# Altium footprint library new-version2.PcbLib: 88 footprints (part 6 of 6)
Each footprint in its own frame and in the unit in brackets; x right, y up, seen from the top. Pads: shape width x height; smd on the part's side, far side on the other; paste and mask are expansions set on the pad; w line width, h text height; cw(c..) or ccw(c..) is an arc to the next point about the centre after c.
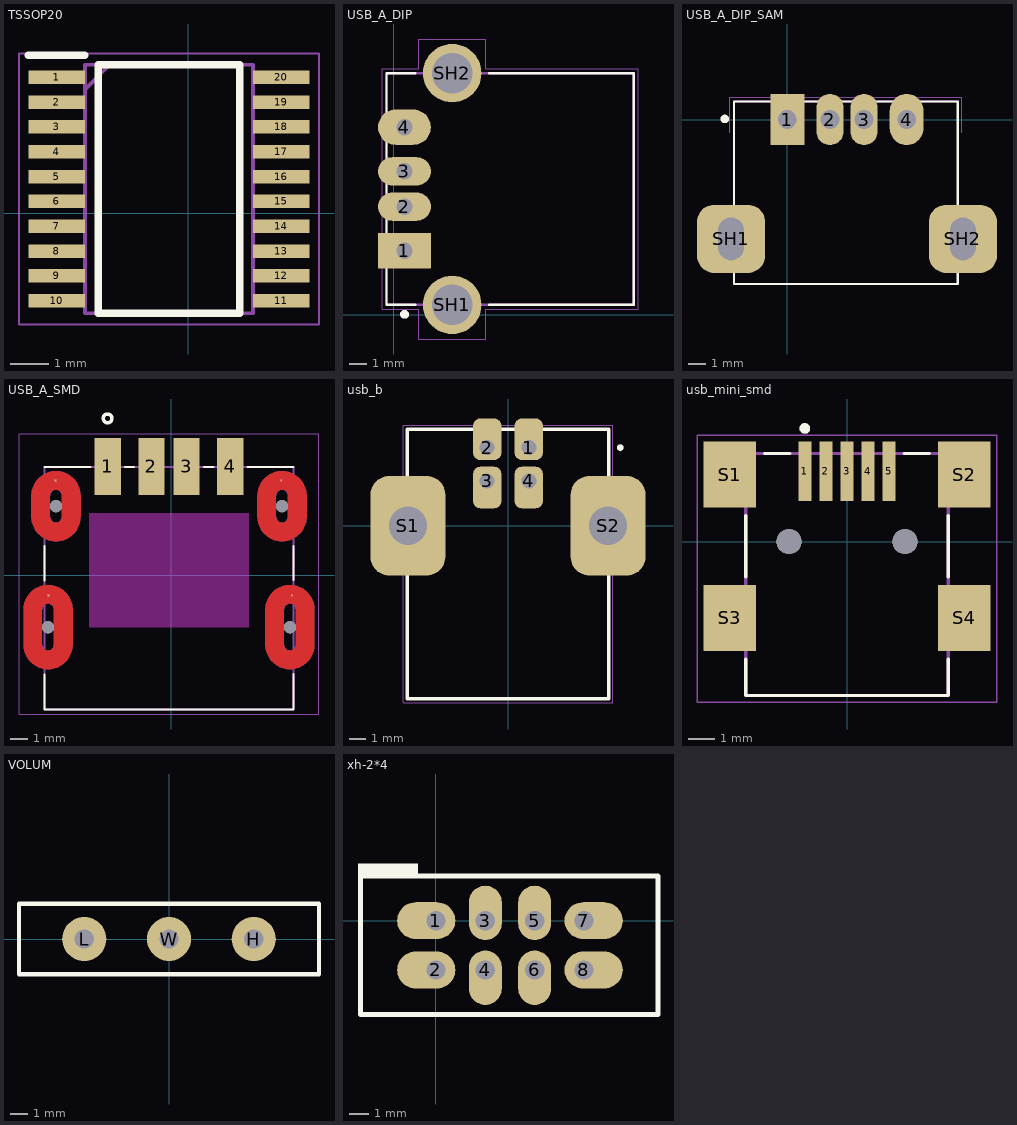
[diagram p5: the footprints below, top view; thin cyan lines are the x and y axes]

## TSSOP20 [mm]
pads (20):
  rect 1.475x0.356 smd: 1(-3.446,3.56) 2(-3.446,2.91) 3(-3.446,2.26) 4(-3.446,1.61) 5(-3.446,0.96) 6(-3.446,0.31) 7(-3.446,-0.34) 8(-3.446,-0.99) 9(-3.446,-1.64) 10(-3.446,-2.29) 11(2.43,-2.29) 12(2.43,-1.64) 13(2.43,-0.99) 14(2.43,-0.34) 15(2.43,0.31) 16(2.43,0.96) 17(2.43,1.61) 18(2.43,2.26) 19(2.43,2.91) 20(2.43,3.56)
Top Overlay:
  lines w0.2: -4.183,4.135 -2.708,4.135 ; -2.358,-2.615 -2.358,3.885 1.342,3.885 1.342,-2.615 -2.358,-2.615
Mechanical 13:
  lines w0.05: -4.433,-2.915 -4.433,4.185 3.417,4.185 3.417,-2.915 -4.433,-2.915
  lines w0.1: -2.708,3.235 -2.058,3.885 ; -2.708,-2.615 -2.708,3.885 1.692,3.885 1.692,-2.615 -2.708,-2.615

## USB_A_DIP [mm]
pads (6):
  rect 3x2 hole 0.92: 1(0.592,3.612)
  oval 3x1.6 hole 0.92: 2(0.592,6.112) 3(0.592,8.112)
  oval 3x2 hole 0.92: 4(0.592,10.612)
  round 3.316 hole 2.3: SH1(3.302,0.542) SH2(3.302,13.682)
Top Overlay:
  circle w0.3: c0.602,0.012 r0.1
  lines w0.127: 1.202,0.547 -0.418,0.547 -0.418,13.677 1.202,13.677 ; 5.402,0.547 13.582,0.547 13.582,13.677 5.402,13.677
Mechanical 13:
  lines w0.127: -0.418,0.547 13.582,0.547 13.582,13.677 -0.418,13.677 -0.418,0.547
Mechanical 15:
  lines w0.05: -0.668,0.297 1.402,0.297 1.402,-1.388 5.202,-1.388 5.202,0.297 13.832,0.297 13.832,13.927 5.202,13.927 5.202,15.612 1.402,15.612 1.402,13.927 -0.668,13.927 -0.668,0.297

## USB_A_DIP_SAM [mm]
pads (6):
  rect 2x3 hole 1.1: 1(0,0)
  oval 1.6x3 hole 1.1: 2(2.5,0) 3(4.5,0)
  oval 2x3 hole 1.1: 4(7,0)
  rrect50% 4x4 hole 2.5 slot 1.5 at 0 deg: SH1(-3.3,-7) SH2(10.3,-7)
Top Overlay:
  circle w0.3: c-3.671,0.033 r0.1
  lines w0.127: -3.136,-0.567 -3.136,1.053 9.994,1.053 9.994,-0.567 9.994,-9.652 -3.136,-9.652 -3.136,-0.381
Mechanical 13:
  lines w0.127: -3.136,1.053 9.994,1.053
Mechanical 15:
  lines w0.05: -3.386,-0.767 -3.386,1.303 10.244,1.303 10.244,-0.767

## USB_A_SMD [mm]
pads (12):
  rect 1.5x3.25 smd: 1(-3.627,6.207) 2(-1.127,6.207) 3(0.873,6.207) 4(3.373,6.207)
  rect 0.1x0.1 smd paste-1 mask+0: P1(-6.597,5.407) P2(6.273,5.407) SH1(-6.997,-1.163) SH2(6.873,-1.163)
  round 0.7 hole 0.7 unplated: ""(-7.027,-2.973) ""(-6.577,3.937) ""(6.323,3.937) ""(6.773,-2.973)
Top Layer:
  region: 6.396,5.935 6.469,5.929 6.542,5.92 6.614,5.906 6.685,5.889 6.756,5.868 6.825,5.844 6.892,5.816 6.959,5.784 7.023,5.749 7.085,5.711 7.146,5.67 7.204,5.625 7.26,5.577 7.313,5.527 7.363,5.474 7.411,5.418 7.456,5.36 7.497,5.299 7.535,5.237 7.57,5.173 7.602,5.106 7.63,5.039 7.654,4.97 7.675,4.899 7.692,4.828 7.706,4.756 7.715,4.683 7.721,4.61 7.723,4.537 7.723,3.337 7.721,3.264 7.715,3.191 7.706,3.118 7.692,3.046 7.675,2.975 7.654,2.904 7.63,2.835 7.602,2.768 7.57,2.701 7.535,2.637 7.497,2.575 7.456,2.514 7.411,2.456 7.363,2.4 7.313,2.347 7.26,2.297 7.204,2.249 7.146,2.204 7.085,2.163 7.023,2.125 6.959,2.09 6.892,2.058 6.825,2.03 6.756,2.006 6.685,1.985 6.614,1.968 6.542,1.954 6.469,1.945 6.396,1.939 6.323,1.937 6.323,2.987 6.341,2.987 6.36,2.989 6.378,2.991 6.396,2.995 6.414,2.999 6.431,3.004 6.448,3.01 6.465,3.017 6.482,3.025 6.498,3.034 6.514,3.043 6.529,3.054 6.543,3.065 6.557,3.077 6.57,3.09 6.583,3.103 6.595,3.117 6.606,3.131 6.617,3.146 6.626,3.162 6.635,3.178 6.643,3.195 6.65,3.212 6.656,3.229 6.661,3.246 6.665,3.264 6.669,3.282 6.671,3.3 6.673,3.319 6.673,3.337 6.673,4.537 6.673,4.555 6.671,4.574 6.669,4.592 6.665,4.61 6.661,4.628 6.656,4.645 6.65,4.662 6.643,4.679 6.635,4.696 6.626,4.712 6.617,4.728 6.606,4.743 6.595,4.757 6.583,4.771 6.57,4.784 6.557,4.797 6.543,4.809 6.529,4.82 6.514,4.831 6.498,4.84 6.482,4.849 6.465,4.857 6.448,4.864 6.431,4.87 6.414,4.875 6.396,4.879 6.378,4.883 6.36,4.885 6.341,4.887 6.323,4.887 6.323,5.937
  region: 6.323,4.887 6.305,4.887 6.286,4.885 6.268,4.883 6.25,4.879 6.232,4.875 6.215,4.87 6.198,4.864 6.181,4.857 6.164,4.849 6.148,4.84 6.132,4.831 6.117,4.82 6.103,4.809 6.089,4.797 6.076,4.784 6.063,4.771 6.051,4.757 6.04,4.743 6.029,4.728 6.02,4.712 6.011,4.696 6.003,4.679 5.996,4.662 5.99,4.645 5.985,4.628 5.981,4.61 5.977,4.592 5.975,4.574 5.973,4.555 5.973,4.537 5.973,3.337 5.973,3.319 5.975,3.3 5.977,3.282 5.981,3.264 5.985,3.246 5.99,3.229 5.996,3.212 6.003,3.195 6.011,3.178 6.02,3.162 6.029,3.146 6.04,3.131 6.051,3.117 6.063,3.103 6.076,3.09 6.089,3.077 6.103,3.065 6.117,3.054 6.132,3.043 6.148,3.034 6.164,3.025 6.181,3.017 6.198,3.01 6.215,3.004 6.232,2.999 6.25,2.995 6.268,2.991 6.286,2.989 6.305,2.987 6.323,2.987 6.323,1.937 6.25,1.939 6.177,1.945 6.104,1.954 6.032,1.968 5.961,1.985 5.89,2.006 5.821,2.03 5.754,2.058 5.687,2.09 5.623,2.125 5.561,2.163 5.5,2.204 5.442,2.249 5.386,2.297 5.333,2.347 5.283,2.4 5.235,2.456 5.19,2.514 5.149,2.575 5.111,2.637 5.076,2.701 5.044,2.768 5.016,2.835 4.992,2.904 4.971,2.975 4.954,3.046 4.94,3.118 4.931,3.191 4.925,3.264 4.923,3.337 4.923,4.537 4.925,4.61 4.931,4.683 4.94,4.756 4.954,4.828 4.971,4.899 4.992,4.97 5.016,5.039 5.044,5.106 5.076,5.173 5.111,5.237 5.149,5.299 5.19,5.36 5.235,5.418 5.283,5.474 5.333,5.527 5.386,5.577 5.442,5.625 5.5,5.67 5.561,5.711 5.623,5.749 5.687,5.784 5.754,5.816 5.821,5.844 5.89,5.868 5.961,5.889 6.032,5.906 6.104,5.92 6.177,5.929 6.25,5.935 6.323,5.937
  region: -6.504,5.935 -6.431,5.929 -6.358,5.92 -6.286,5.906 -6.215,5.889 -6.144,5.868 -6.075,5.844 -6.008,5.816 -5.941,5.784 -5.877,5.749 -5.815,5.711 -5.754,5.67 -5.696,5.625 -5.64,5.577 -5.587,5.527 -5.537,5.474 -5.489,5.418 -5.444,5.36 -5.403,5.299 -5.365,5.237 -5.33,5.173 -5.298,5.106 -5.27,5.039 -5.246,4.97 -5.225,4.899 -5.208,4.828 -5.194,4.756 -5.185,4.683 -5.179,4.61 -5.177,4.537 -5.177,3.337 -5.179,3.264 -5.185,3.191 -5.194,3.118 -5.208,3.046 -5.225,2.975 -5.246,2.904 -5.27,2.835 -5.298,2.768 -5.33,2.701 -5.365,2.637 -5.403,2.575 -5.444,2.514 -5.489,2.456 -5.537,2.4 -5.587,2.347 -5.64,2.297 -5.696,2.249 -5.754,2.204 -5.815,2.163 -5.877,2.125 -5.941,2.09 -6.008,2.058 -6.075,2.03 -6.144,2.006 -6.215,1.985 -6.286,1.968 -6.358,1.954 -6.431,1.945 -6.504,1.939 -6.577,1.937 -6.577,2.987 -6.559,2.987 -6.54,2.989 -6.522,2.991 -6.504,2.995 -6.486,2.999 -6.469,3.004 -6.452,3.01 -6.435,3.017 -6.418,3.025 -6.402,3.034 -6.386,3.043 -6.371,3.054 -6.357,3.065 -6.343,3.077 -6.33,3.09 -6.317,3.103 -6.305,3.117 -6.294,3.131 -6.283,3.146 -6.274,3.162 -6.265,3.178 -6.257,3.195 -6.25,3.212 -6.244,3.229 -6.239,3.246 -6.235,3.264 -6.231,3.282 -6.229,3.3 -6.227,3.319 -6.227,3.337 -6.227,4.537 -6.227,4.555 -6.229,4.574 -6.231,4.592 -6.235,4.61 -6.239,4.628 -6.244,4.645 -6.25,4.662 -6.257,4.679 -6.265,4.696 -6.274,4.712 -6.283,4.728 -6.294,4.743 -6.305,4.757 -6.317,4.771 -6.33,4.784 -6.343,4.797 -6.357,4.809 -6.371,4.82 -6.386,4.831 -6.402,4.84 -6.418,4.849 -6.435,4.857 -6.452,4.864 -6.469,4.87 -6.486,4.875 -6.504,4.879 -6.522,4.883 -6.54,4.885 -6.559,4.887 -6.577,4.887 -6.577,5.937
  region: -6.577,4.887 -6.595,4.887 -6.614,4.885 -6.632,4.883 -6.65,4.879 -6.668,4.875 -6.685,4.87 -6.702,4.864 -6.719,4.857 -6.736,4.849 -6.752,4.84 -6.768,4.831 -6.783,4.82 -6.797,4.809 -6.811,4.797 -6.824,4.784 -6.837,4.771 -6.849,4.757 -6.86,4.743 -6.871,4.728 -6.88,4.712 -6.889,4.696 -6.897,4.679 -6.904,4.662 -6.91,4.645 -6.915,4.628 -6.919,4.61 -6.923,4.592 -6.925,4.574 -6.927,4.555 -6.927,4.537 -6.927,3.337 -6.927,3.319 -6.925,3.3 -6.923,3.282 -6.919,3.264 -6.915,3.246 -6.91,3.229 -6.904,3.212 -6.897,3.195 -6.889,3.178 -6.88,3.162 -6.871,3.146 -6.86,3.131 -6.849,3.117 -6.837,3.103 -6.824,3.09 -6.811,3.077 -6.797,3.065 -6.783,3.054 -6.768,3.043 -6.752,3.034 -6.736,3.025 -6.719,3.017 -6.702,3.01 -6.685,3.004 -6.668,2.999 -6.65,2.995 -6.632,2.991 -6.614,2.989 -6.595,2.987 -6.577,2.987 -6.577,1.937 -6.65,1.939 -6.723,1.945 -6.796,1.954 -6.868,1.968 -6.939,1.985 -7.01,2.006 -7.079,2.03 -7.146,2.058 -7.213,2.09 -7.277,2.125 -7.339,2.163 -7.4,2.204 -7.458,2.249 -7.514,2.297 -7.567,2.347 -7.617,2.4 -7.665,2.456 -7.71,2.514 -7.751,2.575 -7.789,2.637 -7.824,2.701 -7.856,2.768 -7.884,2.835 -7.908,2.904 -7.929,2.975 -7.946,3.046 -7.96,3.118 -7.969,3.191 -7.975,3.264 -7.977,3.337 -7.977,4.537 -7.975,4.61 -7.969,4.683 -7.96,4.756 -7.946,4.828 -7.929,4.899 -7.908,4.97 -7.884,5.039 -7.856,5.106 -7.824,5.173 -7.789,5.237 -7.751,5.299 -7.71,5.36 -7.665,5.418 -7.617,5.474 -7.567,5.527 -7.514,5.577 -7.458,5.625 -7.4,5.67 -7.339,5.711 -7.277,5.749 -7.213,5.784 -7.146,5.816 -7.079,5.844 -7.01,5.868 -6.939,5.889 -6.868,5.906 -6.796,5.92 -6.723,5.929 -6.65,5.935 -6.577,5.937
  region: 6.846,-0.565 6.919,-0.571 6.992,-0.58 7.064,-0.594 7.135,-0.611 7.206,-0.632 7.275,-0.656 7.342,-0.684 7.409,-0.716 7.473,-0.751 7.535,-0.789 7.596,-0.83 7.654,-0.875 7.71,-0.923 7.763,-0.973 7.813,-1.026 7.861,-1.082 7.906,-1.14 7.947,-1.201 7.985,-1.263 8.02,-1.327 8.052,-1.394 8.08,-1.461 8.104,-1.53 8.125,-1.601 8.142,-1.672 8.156,-1.744 8.165,-1.817 8.171,-1.89 8.173,-1.963 8.173,-3.963 8.171,-4.036 8.165,-4.109 8.156,-4.182 8.142,-4.254 8.125,-4.325 8.104,-4.396 8.08,-4.465 8.052,-4.532 8.02,-4.599 7.985,-4.663 7.947,-4.725 7.906,-4.786 7.861,-4.844 7.813,-4.9 7.763,-4.953 7.71,-5.003 7.654,-5.051 7.596,-5.096 7.535,-5.137 7.473,-5.175 7.409,-5.21 7.342,-5.242 7.275,-5.27 7.206,-5.294 7.135,-5.315 7.064,-5.332 6.992,-5.346 6.919,-5.355 6.846,-5.361 6.773,-5.363 6.773,-4.313 6.791,-4.313 6.81,-4.311 6.828,-4.309 6.846,-4.305 6.864,-4.301 6.881,-4.296 6.898,-4.29 6.915,-4.283 6.932,-4.275 6.948,-4.266 6.964,-4.257 6.979,-4.246 6.993,-4.235 7.007,-4.223 7.02,-4.21 7.033,-4.197 7.045,-4.183 7.056,-4.169 7.067,-4.154 7.076,-4.138 7.085,-4.122 7.093,-4.105 7.1,-4.088 7.106,-4.071 7.111,-4.054 7.115,-4.036 7.119,-4.018 7.121,-4 7.123,-3.981 7.123,-3.963 7.123,-1.963 7.123,-1.945 7.121,-1.926 7.119,-1.908 7.115,-1.89 7.111,-1.872 7.106,-1.855 7.1,-1.838 7.093,-1.821 7.085,-1.804 7.076,-1.788 7.067,-1.772 7.056,-1.757 7.045,-1.743 7.033,-1.729 7.02,-1.716 7.007,-1.703 6.993,-1.691 6.979,-1.68 6.964,-1.669 6.948,-1.66 6.932,-1.651 6.915,-1.643 6.898,-1.636 6.881,-1.63 6.864,-1.625 6.846,-1.621 6.828,-1.617 6.81,-1.615 6.791,-1.613 6.773,-1.613 6.773,-0.563
  region: 6.773,-1.613 6.755,-1.613 6.736,-1.615 6.718,-1.617 6.7,-1.621 6.682,-1.625 6.665,-1.63 6.648,-1.636 6.631,-1.643 6.614,-1.651 6.598,-1.66 6.582,-1.669 6.567,-1.68 6.553,-1.691 6.539,-1.703 6.526,-1.716 6.513,-1.729 6.501,-1.743 6.49,-1.757 6.479,-1.772 6.47,-1.788 6.461,-1.804 6.453,-1.821 6.446,-1.838 6.44,-1.855 6.435,-1.872 6.431,-1.89 6.427,-1.908 6.425,-1.926 6.423,-1.945 6.423,-1.963 6.423,-3.963 6.423,-3.981 6.425,-4 6.427,-4.018 6.431,-4.036 6.435,-4.054 6.44,-4.071 6.446,-4.088 6.453,-4.105 6.461,-4.122 6.47,-4.138 6.479,-4.154 6.49,-4.169 6.501,-4.183 6.513,-4.197 6.526,-4.21 6.539,-4.223 6.553,-4.235 6.567,-4.246 6.582,-4.257 6.598,-4.266 6.614,-4.275 6.631,-4.283 6.648,-4.29 6.665,-4.296 6.682,-4.301 6.7,-4.305 6.718,-4.309 6.736,-4.311 6.755,-4.313 6.773,-4.313 6.773,-5.363 6.7,-5.361 6.627,-5.355 6.554,-5.346 6.482,-5.332 6.411,-5.315 6.34,-5.294 6.271,-5.27 6.204,-5.242 6.137,-5.21 6.073,-5.175 6.011,-5.137 5.95,-5.096 5.892,-5.051 5.836,-5.003 5.783,-4.953 5.733,-4.9 5.685,-4.844 5.64,-4.786 5.599,-4.725 5.561,-4.663 5.526,-4.599 5.494,-4.532 5.466,-4.465 5.442,-4.396 5.421,-4.325 5.404,-4.254 5.39,-4.182 5.381,-4.109 5.375,-4.036 5.373,-3.963 5.373,-1.963 5.375,-1.89 5.381,-1.817 5.39,-1.744 5.404,-1.672 5.421,-1.601 5.442,-1.53 5.466,-1.461 5.494,-1.394 5.526,-1.327 5.561,-1.263 5.599,-1.201 5.64,-1.14 5.685,-1.082 5.733,-1.026 5.783,-0.973 5.836,-0.923 5.892,-0.875 5.95,-0.83 6.011,-0.789 6.073,-0.751 6.137,-0.716 6.204,-0.684 6.271,-0.656 6.34,-0.632 6.411,-0.611 6.482,-0.594 6.554,-0.58 6.627,-0.571 6.7,-0.565 6.773,-0.563
  region: -6.954,-0.565 -6.881,-0.571 -6.808,-0.58 -6.736,-0.594 -6.665,-0.611 -6.594,-0.632 -6.525,-0.656 -6.458,-0.684 -6.391,-0.716 -6.327,-0.751 -6.265,-0.789 -6.204,-0.83 -6.146,-0.875 -6.09,-0.923 -6.037,-0.973 -5.987,-1.026 -5.939,-1.082 -5.894,-1.14 -5.853,-1.201 -5.815,-1.263 -5.78,-1.327 -5.748,-1.394 -5.72,-1.461 -5.696,-1.53 -5.675,-1.601 -5.658,-1.672 -5.644,-1.744 -5.635,-1.817 -5.629,-1.89 -5.627,-1.963 -5.627,-3.963 -5.629,-4.036 -5.635,-4.109 -5.644,-4.182 -5.658,-4.254 -5.675,-4.325 -5.696,-4.396 -5.72,-4.465 -5.748,-4.532 -5.78,-4.599 -5.815,-4.663 -5.853,-4.725 -5.894,-4.786 -5.939,-4.844 -5.987,-4.9 -6.037,-4.953 -6.09,-5.003 -6.146,-5.051 -6.204,-5.096 -6.265,-5.137 -6.327,-5.175 -6.391,-5.21 -6.458,-5.242 -6.525,-5.27 -6.594,-5.294 -6.665,-5.315 -6.736,-5.332 -6.808,-5.346 -6.881,-5.355 -6.954,-5.361 -7.027,-5.363 -7.027,-4.313 -7.009,-4.313 -6.99,-4.311 -6.972,-4.309 -6.954,-4.305 -6.936,-4.301 -6.919,-4.296 -6.902,-4.29 -6.885,-4.283 -6.868,-4.275 -6.852,-4.266 -6.836,-4.257 -6.821,-4.246 -6.807,-4.235 -6.793,-4.223 -6.78,-4.21 -6.767,-4.197 -6.755,-4.183 -6.744,-4.169 -6.733,-4.154 -6.724,-4.138 -6.715,-4.122 -6.707,-4.105 -6.7,-4.088 -6.694,-4.071 -6.689,-4.054 -6.685,-4.036 -6.681,-4.018 -6.679,-4 -6.677,-3.981 -6.677,-3.963 -6.677,-1.963 -6.677,-1.945 -6.679,-1.926 -6.681,-1.908 -6.685,-1.89 -6.689,-1.872 -6.694,-1.855 -6.7,-1.838 -6.707,-1.821 -6.715,-1.804 -6.724,-1.788 -6.733,-1.772 -6.744,-1.757 -6.755,-1.743 -6.767,-1.729 -6.78,-1.716 -6.793,-1.703 -6.807,-1.691 -6.821,-1.68 -6.836,-1.669 -6.852,-1.66 -6.868,-1.651 -6.885,-1.643 -6.902,-1.636 -6.919,-1.63 -6.936,-1.625 -6.954,-1.621 -6.972,-1.617 -6.99,-1.615 -7.009,-1.613 -7.027,-1.613 -7.027,-0.563
  region: -7.027,-1.613 -7.045,-1.613 -7.064,-1.615 -7.082,-1.617 -7.1,-1.621 -7.118,-1.625 -7.135,-1.63 -7.152,-1.636 -7.169,-1.643 -7.186,-1.651 -7.202,-1.66 -7.218,-1.669 -7.233,-1.68 -7.247,-1.691 -7.261,-1.703 -7.274,-1.716 -7.287,-1.729 -7.299,-1.743 -7.31,-1.757 -7.321,-1.772 -7.33,-1.788 -7.339,-1.804 -7.347,-1.821 -7.354,-1.838 -7.36,-1.855 -7.365,-1.872 -7.369,-1.89 -7.373,-1.908 -7.375,-1.926 -7.377,-1.945 -7.377,-1.963 -7.377,-3.963 -7.377,-3.981 -7.375,-4 -7.373,-4.018 -7.369,-4.036 -7.365,-4.054 -7.36,-4.071 -7.354,-4.088 -7.347,-4.105 -7.339,-4.122 -7.33,-4.138 -7.321,-4.154 -7.31,-4.169 -7.299,-4.183 -7.287,-4.197 -7.274,-4.21 -7.261,-4.223 -7.247,-4.235 -7.233,-4.246 -7.218,-4.257 -7.202,-4.266 -7.186,-4.275 -7.169,-4.283 -7.152,-4.29 -7.135,-4.296 -7.118,-4.301 -7.1,-4.305 -7.082,-4.309 -7.064,-4.311 -7.045,-4.313 -7.027,-4.313 -7.027,-5.363 -7.1,-5.361 -7.173,-5.355 -7.246,-5.346 -7.318,-5.332 -7.389,-5.315 -7.46,-5.294 -7.529,-5.27 -7.596,-5.242 -7.663,-5.21 -7.727,-5.175 -7.789,-5.137 -7.85,-5.096 -7.908,-5.051 -7.964,-5.003 -8.017,-4.953 -8.067,-4.9 -8.115,-4.844 -8.16,-4.786 -8.201,-4.725 -8.239,-4.663 -8.274,-4.599 -8.306,-4.532 -8.334,-4.465 -8.358,-4.396 -8.379,-4.325 -8.396,-4.254 -8.41,-4.182 -8.419,-4.109 -8.425,-4.036 -8.427,-3.963 -8.427,-1.963 -8.425,-1.89 -8.419,-1.817 -8.41,-1.744 -8.396,-1.672 -8.379,-1.601 -8.358,-1.53 -8.334,-1.461 -8.306,-1.394 -8.274,-1.327 -8.239,-1.263 -8.201,-1.201 -8.16,-1.14 -8.115,-1.082 -8.067,-1.026 -8.017,-0.973 -7.964,-0.923 -7.908,-0.875 -7.85,-0.83 -7.789,-0.789 -7.727,-0.751 -7.663,-0.716 -7.596,-0.684 -7.529,-0.656 -7.46,-0.632 -7.389,-0.611 -7.318,-0.594 -7.246,-0.58 -7.173,-0.571 -7.1,-0.565 -7.027,-0.563
Bottom Layer:
  region: 6.396,5.935 6.469,5.929 6.542,5.92 6.614,5.906 6.685,5.889 6.756,5.868 6.825,5.844 6.892,5.816 6.959,5.784 7.023,5.749 7.085,5.711 7.146,5.67 7.204,5.625 7.26,5.577 7.313,5.527 7.363,5.474 7.411,5.418 7.456,5.36 7.497,5.299 7.535,5.237 7.57,5.173 7.602,5.106 7.63,5.039 7.654,4.97 7.675,4.899 7.692,4.828 7.706,4.756 7.715,4.683 7.721,4.61 7.723,4.537 7.723,3.337 7.721,3.264 7.715,3.191 7.706,3.118 7.692,3.046 7.675,2.975 7.654,2.904 7.63,2.835 7.602,2.768 7.57,2.701 7.535,2.637 7.497,2.575 7.456,2.514 7.411,2.456 7.363,2.4 7.313,2.347 7.26,2.297 7.204,2.249 7.146,2.204 7.085,2.163 7.023,2.125 6.959,2.09 6.892,2.058 6.825,2.03 6.756,2.006 6.685,1.985 6.614,1.968 6.542,1.954 6.469,1.945 6.396,1.939 6.323,1.937 6.323,2.987 6.341,2.987 6.36,2.989 6.378,2.991 6.396,2.995 6.414,2.999 6.431,3.004 6.448,3.01 6.465,3.017 6.482,3.025 6.498,3.034 6.514,3.043 6.529,3.054 6.543,3.065 6.557,3.077 6.57,3.09 6.583,3.103 6.595,3.117 6.606,3.131 6.617,3.146 6.626,3.162 6.635,3.178 6.643,3.195 6.65,3.212 6.656,3.229 6.661,3.246 6.665,3.264 6.669,3.282 6.671,3.3 6.673,3.319 6.673,3.337 6.673,4.537 6.673,4.555 6.671,4.574 6.669,4.592 6.665,4.61 6.661,4.628 6.656,4.645 6.65,4.662 6.643,4.679 6.635,4.696 6.626,4.712 6.617,4.728 6.606,4.743 6.595,4.757 6.583,4.771 6.57,4.784 6.557,4.797 6.543,4.809 6.529,4.82 6.514,4.831 6.498,4.84 6.482,4.849 6.465,4.857 6.448,4.864 6.431,4.87 6.414,4.875 6.396,4.879 6.378,4.883 6.36,4.885 6.341,4.887 6.323,4.887 6.323,5.937
  region: 6.323,4.887 6.305,4.887 6.286,4.885 6.268,4.883 6.25,4.879 6.232,4.875 6.215,4.87 6.198,4.864 6.181,4.857 6.164,4.849 6.148,4.84 6.132,4.831 6.117,4.82 6.103,4.809 6.089,4.797 6.076,4.784 6.063,4.771 6.051,4.757 6.04,4.743 6.029,4.728 6.02,4.712 6.011,4.696 6.003,4.679 5.996,4.662 5.99,4.645 5.985,4.628 5.981,4.61 5.977,4.592 5.975,4.574 5.973,4.555 5.973,4.537 5.973,3.337 5.973,3.319 5.975,3.3 5.977,3.282 5.981,3.264 5.985,3.246 5.99,3.229 5.996,3.212 6.003,3.195 6.011,3.178 6.02,3.162 6.029,3.146 6.04,3.131 6.051,3.117 6.063,3.103 6.076,3.09 6.089,3.077 6.103,3.065 6.117,3.054 6.132,3.043 6.148,3.034 6.164,3.025 6.181,3.017 6.198,3.01 6.215,3.004 6.232,2.999 6.25,2.995 6.268,2.991 6.286,2.989 6.305,2.987 6.323,2.987 6.323,1.937 6.25,1.939 6.177,1.945 6.104,1.954 6.032,1.968 5.961,1.985 5.89,2.006 5.821,2.03 5.754,2.058 5.687,2.09 5.623,2.125 5.561,2.163 5.5,2.204 5.442,2.249 5.386,2.297 5.333,2.347 5.283,2.4 5.235,2.456 5.19,2.514 5.149,2.575 5.111,2.637 5.076,2.701 5.044,2.768 5.016,2.835 4.992,2.904 4.971,2.975 4.954,3.046 4.94,3.118 4.931,3.191 4.925,3.264 4.923,3.337 4.923,4.537 4.925,4.61 4.931,4.683 4.94,4.756 4.954,4.828 4.971,4.899 4.992,4.97 5.016,5.039 5.044,5.106 5.076,5.173 5.111,5.237 5.149,5.299 5.19,5.36 5.235,5.418 5.283,5.474 5.333,5.527 5.386,5.577 5.442,5.625 5.5,5.67 5.561,5.711 5.623,5.749 5.687,5.784 5.754,5.816 5.821,5.844 5.89,5.868 5.961,5.889 6.032,5.906 6.104,5.92 6.177,5.929 6.25,5.935 6.323,5.937
  region: -6.504,5.935 -6.431,5.929 -6.358,5.92 -6.286,5.906 -6.215,5.889 -6.144,5.868 -6.075,5.844 -6.008,5.816 -5.941,5.784 -5.877,5.749 -5.815,5.711 -5.754,5.67 -5.696,5.625 -5.64,5.577 -5.587,5.527 -5.537,5.474 -5.489,5.418 -5.444,5.36 -5.403,5.299 -5.365,5.237 -5.33,5.173 -5.298,5.106 -5.27,5.039 -5.246,4.97 -5.225,4.899 -5.208,4.828 -5.194,4.756 -5.185,4.683 -5.179,4.61 -5.177,4.537 -5.177,3.337 -5.179,3.264 -5.185,3.191 -5.194,3.118 -5.208,3.046 -5.225,2.975 -5.246,2.904 -5.27,2.835 -5.298,2.768 -5.33,2.701 -5.365,2.637 -5.403,2.575 -5.444,2.514 -5.489,2.456 -5.537,2.4 -5.587,2.347 -5.64,2.297 -5.696,2.249 -5.754,2.204 -5.815,2.163 -5.877,2.125 -5.941,2.09 -6.008,2.058 -6.075,2.03 -6.144,2.006 -6.215,1.985 -6.286,1.968 -6.358,1.954 -6.431,1.945 -6.504,1.939 -6.577,1.937 -6.577,2.987 -6.559,2.987 -6.54,2.989 -6.522,2.991 -6.504,2.995 -6.486,2.999 -6.469,3.004 -6.452,3.01 -6.435,3.017 -6.418,3.025 -6.402,3.034 -6.386,3.043 -6.371,3.054 -6.357,3.065 -6.343,3.077 -6.33,3.09 -6.317,3.103 -6.305,3.117 -6.294,3.131 -6.283,3.146 -6.274,3.162 -6.265,3.178 -6.257,3.195 -6.25,3.212 -6.244,3.229 -6.239,3.246 -6.235,3.264 -6.231,3.282 -6.229,3.3 -6.227,3.319 -6.227,3.337 -6.227,4.537 -6.227,4.555 -6.229,4.574 -6.231,4.592 -6.235,4.61 -6.239,4.628 -6.244,4.645 -6.25,4.662 -6.257,4.679 -6.265,4.696 -6.274,4.712 -6.283,4.728 -6.294,4.743 -6.305,4.757 -6.317,4.771 -6.33,4.784 -6.343,4.797 -6.357,4.809 -6.371,4.82 -6.386,4.831 -6.402,4.84 -6.418,4.849 -6.435,4.857 -6.452,4.864 -6.469,4.87 -6.486,4.875 -6.504,4.879 -6.522,4.883 -6.54,4.885 -6.559,4.887 -6.577,4.887 -6.577,5.937
  region: -6.577,4.887 -6.595,4.887 -6.614,4.885 -6.632,4.883 -6.65,4.879 -6.668,4.875 -6.685,4.87 -6.702,4.864 -6.719,4.857 -6.736,4.849 -6.752,4.84 -6.768,4.831 -6.783,4.82 -6.797,4.809 -6.811,4.797 -6.824,4.784 -6.837,4.771 -6.849,4.757 -6.86,4.743 -6.871,4.728 -6.88,4.712 -6.889,4.696 -6.897,4.679 -6.904,4.662 -6.91,4.645 -6.915,4.628 -6.919,4.61 -6.923,4.592 -6.925,4.574 -6.927,4.555 -6.927,4.537 -6.927,3.337 -6.927,3.319 -6.925,3.3 -6.923,3.282 -6.919,3.264 -6.915,3.246 -6.91,3.229 -6.904,3.212 -6.897,3.195 -6.889,3.178 -6.88,3.162 -6.871,3.146 -6.86,3.131 -6.849,3.117 -6.837,3.103 -6.824,3.09 -6.811,3.077 -6.797,3.065 -6.783,3.054 -6.768,3.043 -6.752,3.034 -6.736,3.025 -6.719,3.017 -6.702,3.01 -6.685,3.004 -6.668,2.999 -6.65,2.995 -6.632,2.991 -6.614,2.989 -6.595,2.987 -6.577,2.987 -6.577,1.937 -6.65,1.939 -6.723,1.945 -6.796,1.954 -6.868,1.968 -6.939,1.985 -7.01,2.006 -7.079,2.03 -7.146,2.058 -7.213,2.09 -7.277,2.125 -7.339,2.163 -7.4,2.204 -7.458,2.249 -7.514,2.297 -7.567,2.347 -7.617,2.4 -7.665,2.456 -7.71,2.514 -7.751,2.575 -7.789,2.637 -7.824,2.701 -7.856,2.768 -7.884,2.835 -7.908,2.904 -7.929,2.975 -7.946,3.046 -7.96,3.118 -7.969,3.191 -7.975,3.264 -7.977,3.337 -7.977,4.537 -7.975,4.61 -7.969,4.683 -7.96,4.756 -7.946,4.828 -7.929,4.899 -7.908,4.97 -7.884,5.039 -7.856,5.106 -7.824,5.173 -7.789,5.237 -7.751,5.299 -7.71,5.36 -7.665,5.418 -7.617,5.474 -7.567,5.527 -7.514,5.577 -7.458,5.625 -7.4,5.67 -7.339,5.711 -7.277,5.749 -7.213,5.784 -7.146,5.816 -7.079,5.844 -7.01,5.868 -6.939,5.889 -6.868,5.906 -6.796,5.92 -6.723,5.929 -6.65,5.935 -6.577,5.937
  region: 6.846,-0.565 6.919,-0.571 6.992,-0.58 7.064,-0.594 7.135,-0.611 7.206,-0.632 7.275,-0.656 7.342,-0.684 7.409,-0.716 7.473,-0.751 7.535,-0.789 7.596,-0.83 7.654,-0.875 7.71,-0.923 7.763,-0.973 7.813,-1.026 7.861,-1.082 7.906,-1.14 7.947,-1.201 7.985,-1.263 8.02,-1.327 8.052,-1.394 8.08,-1.461 8.104,-1.53 8.125,-1.601 8.142,-1.672 8.156,-1.744 8.165,-1.817 8.171,-1.89 8.173,-1.963 8.173,-3.963 8.171,-4.036 8.165,-4.109 8.156,-4.182 8.142,-4.254 8.125,-4.325 8.104,-4.396 8.08,-4.465 8.052,-4.532 8.02,-4.599 7.985,-4.663 7.947,-4.725 7.906,-4.786 7.861,-4.844 7.813,-4.9 7.763,-4.953 7.71,-5.003 7.654,-5.051 7.596,-5.096 7.535,-5.137 7.473,-5.175 7.409,-5.21 7.342,-5.242 7.275,-5.27 7.206,-5.294 7.135,-5.315 7.064,-5.332 6.992,-5.346 6.919,-5.355 6.846,-5.361 6.773,-5.363 6.773,-4.313 6.791,-4.313 6.81,-4.311 6.828,-4.309 6.846,-4.305 6.864,-4.301 6.881,-4.296 6.898,-4.29 6.915,-4.283 6.932,-4.275 6.948,-4.266 6.964,-4.257 6.979,-4.246 6.993,-4.235 7.007,-4.223 7.02,-4.21 7.033,-4.197 7.045,-4.183 7.056,-4.169 7.067,-4.154 7.076,-4.138 7.085,-4.122 7.093,-4.105 7.1,-4.088 7.106,-4.071 7.111,-4.054 7.115,-4.036 7.119,-4.018 7.121,-4 7.123,-3.981 7.123,-3.963 7.123,-1.963 7.123,-1.945 7.121,-1.926 7.119,-1.908 7.115,-1.89 7.111,-1.872 7.106,-1.855 7.1,-1.838 7.093,-1.821 7.085,-1.804 7.076,-1.788 7.067,-1.772 7.056,-1.757 7.045,-1.743 7.033,-1.729 7.02,-1.716 7.007,-1.703 6.993,-1.691 6.979,-1.68 6.964,-1.669 6.948,-1.66 6.932,-1.651 6.915,-1.643 6.898,-1.636 6.881,-1.63 6.864,-1.625 6.846,-1.621 6.828,-1.617 6.81,-1.615 6.791,-1.613 6.773,-1.613 6.773,-0.563
  region: 6.773,-1.613 6.755,-1.613 6.736,-1.615 6.718,-1.617 6.7,-1.621 6.682,-1.625 6.665,-1.63 6.648,-1.636 6.631,-1.643 6.614,-1.651 6.598,-1.66 6.582,-1.669 6.567,-1.68 6.553,-1.691 6.539,-1.703 6.526,-1.716 6.513,-1.729 6.501,-1.743 6.49,-1.757 6.479,-1.772 6.47,-1.788 6.461,-1.804 6.453,-1.821 6.446,-1.838 6.44,-1.855 6.435,-1.872 6.431,-1.89 6.427,-1.908 6.425,-1.926 6.423,-1.945 6.423,-1.963 6.423,-3.963 6.423,-3.981 6.425,-4 6.427,-4.018 6.431,-4.036 6.435,-4.054 6.44,-4.071 6.446,-4.088 6.453,-4.105 6.461,-4.122 6.47,-4.138 6.479,-4.154 6.49,-4.169 6.501,-4.183 6.513,-4.197 6.526,-4.21 6.539,-4.223 6.553,-4.235 6.567,-4.246 6.582,-4.257 6.598,-4.266 6.614,-4.275 6.631,-4.283 6.648,-4.29 6.665,-4.296 6.682,-4.301 6.7,-4.305 6.718,-4.309 6.736,-4.311 6.755,-4.313 6.773,-4.313 6.773,-5.363 6.7,-5.361 6.627,-5.355 6.554,-5.346 6.482,-5.332 6.411,-5.315 6.34,-5.294 6.271,-5.27 6.204,-5.242 6.137,-5.21 6.073,-5.175 6.011,-5.137 5.95,-5.096 5.892,-5.051 5.836,-5.003 5.783,-4.953 5.733,-4.9 5.685,-4.844 5.64,-4.786 5.599,-4.725 5.561,-4.663 5.526,-4.599 5.494,-4.532 5.466,-4.465 5.442,-4.396 5.421,-4.325 5.404,-4.254 5.39,-4.182 5.381,-4.109 5.375,-4.036 5.373,-3.963 5.373,-1.963 5.375,-1.89 5.381,-1.817 5.39,-1.744 5.404,-1.672 5.421,-1.601 5.442,-1.53 5.466,-1.461 5.494,-1.394 5.526,-1.327 5.561,-1.263 5.599,-1.201 5.64,-1.14 5.685,-1.082 5.733,-1.026 5.783,-0.973 5.836,-0.923 5.892,-0.875 5.95,-0.83 6.011,-0.789 6.073,-0.751 6.137,-0.716 6.204,-0.684 6.271,-0.656 6.34,-0.632 6.411,-0.611 6.482,-0.594 6.554,-0.58 6.627,-0.571 6.7,-0.565 6.773,-0.563
  region: -6.954,-0.565 -6.881,-0.571 -6.808,-0.58 -6.736,-0.594 -6.665,-0.611 -6.594,-0.632 -6.525,-0.656 -6.458,-0.684 -6.391,-0.716 -6.327,-0.751 -6.265,-0.789 -6.204,-0.83 -6.146,-0.875 -6.09,-0.923 -6.037,-0.973 -5.987,-1.026 -5.939,-1.082 -5.894,-1.14 -5.853,-1.201 -5.815,-1.263 -5.78,-1.327 -5.748,-1.394 -5.72,-1.461 -5.696,-1.53 -5.675,-1.601 -5.658,-1.672 -5.644,-1.744 -5.635,-1.817 -5.629,-1.89 -5.627,-1.963 -5.627,-3.963 -5.629,-4.036 -5.635,-4.109 -5.644,-4.182 -5.658,-4.254 -5.675,-4.325 -5.696,-4.396 -5.72,-4.465 -5.748,-4.532 -5.78,-4.599 -5.815,-4.663 -5.853,-4.725 -5.894,-4.786 -5.939,-4.844 -5.987,-4.9 -6.037,-4.953 -6.09,-5.003 -6.146,-5.051 -6.204,-5.096 -6.265,-5.137 -6.327,-5.175 -6.391,-5.21 -6.458,-5.242 -6.525,-5.27 -6.594,-5.294 -6.665,-5.315 -6.736,-5.332 -6.808,-5.346 -6.881,-5.355 -6.954,-5.361 -7.027,-5.363 -7.027,-4.313 -7.009,-4.313 -6.99,-4.311 -6.972,-4.309 -6.954,-4.305 -6.936,-4.301 -6.919,-4.296 -6.902,-4.29 -6.885,-4.283 -6.868,-4.275 -6.852,-4.266 -6.836,-4.257 -6.821,-4.246 -6.807,-4.235 -6.793,-4.223 -6.78,-4.21 -6.767,-4.197 -6.755,-4.183 -6.744,-4.169 -6.733,-4.154 -6.724,-4.138 -6.715,-4.122 -6.707,-4.105 -6.7,-4.088 -6.694,-4.071 -6.689,-4.054 -6.685,-4.036 -6.681,-4.018 -6.679,-4 -6.677,-3.981 -6.677,-3.963 -6.677,-1.963 -6.677,-1.945 -6.679,-1.926 -6.681,-1.908 -6.685,-1.89 -6.689,-1.872 -6.694,-1.855 -6.7,-1.838 -6.707,-1.821 -6.715,-1.804 -6.724,-1.788 -6.733,-1.772 -6.744,-1.757 -6.755,-1.743 -6.767,-1.729 -6.78,-1.716 -6.793,-1.703 -6.807,-1.691 -6.821,-1.68 -6.836,-1.669 -6.852,-1.66 -6.868,-1.651 -6.885,-1.643 -6.902,-1.636 -6.919,-1.63 -6.936,-1.625 -6.954,-1.621 -6.972,-1.617 -6.99,-1.615 -7.009,-1.613 -7.027,-1.613 -7.027,-0.563
  region: -7.027,-1.613 -7.045,-1.613 -7.064,-1.615 -7.082,-1.617 -7.1,-1.621 -7.118,-1.625 -7.135,-1.63 -7.152,-1.636 -7.169,-1.643 -7.186,-1.651 -7.202,-1.66 -7.218,-1.669 -7.233,-1.68 -7.247,-1.691 -7.261,-1.703 -7.274,-1.716 -7.287,-1.729 -7.299,-1.743 -7.31,-1.757 -7.321,-1.772 -7.33,-1.788 -7.339,-1.804 -7.347,-1.821 -7.354,-1.838 -7.36,-1.855 -7.365,-1.872 -7.369,-1.89 -7.373,-1.908 -7.375,-1.926 -7.377,-1.945 -7.377,-1.963 -7.377,-3.963 -7.377,-3.981 -7.375,-4 -7.373,-4.018 -7.369,-4.036 -7.365,-4.054 -7.36,-4.071 -7.354,-4.088 -7.347,-4.105 -7.339,-4.122 -7.33,-4.138 -7.321,-4.154 -7.31,-4.169 -7.299,-4.183 -7.287,-4.197 -7.274,-4.21 -7.261,-4.223 -7.247,-4.235 -7.233,-4.246 -7.218,-4.257 -7.202,-4.266 -7.186,-4.275 -7.169,-4.283 -7.152,-4.29 -7.135,-4.296 -7.118,-4.301 -7.1,-4.305 -7.082,-4.309 -7.064,-4.311 -7.045,-4.313 -7.027,-4.313 -7.027,-5.363 -7.1,-5.361 -7.173,-5.355 -7.246,-5.346 -7.318,-5.332 -7.389,-5.315 -7.46,-5.294 -7.529,-5.27 -7.596,-5.242 -7.663,-5.21 -7.727,-5.175 -7.789,-5.137 -7.85,-5.096 -7.908,-5.051 -7.964,-5.003 -8.017,-4.953 -8.067,-4.9 -8.115,-4.844 -8.16,-4.786 -8.201,-4.725 -8.239,-4.663 -8.274,-4.599 -8.306,-4.532 -8.334,-4.465 -8.358,-4.396 -8.379,-4.325 -8.396,-4.254 -8.41,-4.182 -8.419,-4.109 -8.425,-4.036 -8.427,-3.963 -8.427,-1.963 -8.425,-1.89 -8.419,-1.817 -8.41,-1.744 -8.396,-1.672 -8.379,-1.601 -8.358,-1.53 -8.334,-1.461 -8.306,-1.394 -8.274,-1.327 -8.239,-1.263 -8.201,-1.201 -8.16,-1.14 -8.115,-1.082 -8.067,-1.026 -8.017,-0.973 -7.964,-0.923 -7.908,-0.875 -7.85,-0.83 -7.789,-0.789 -7.727,-0.751 -7.663,-0.716 -7.596,-0.684 -7.529,-0.656 -7.46,-0.632 -7.389,-0.611 -7.318,-0.594 -7.246,-0.58 -7.173,-0.571 -7.1,-0.565 -7.027,-0.563
Top Overlay:
  circle w0.2: c-3.63,8.946 r0.25
  lines w0.127: -7.227,-5.663 -7.227,-7.673 6.973,-7.673 6.973,-5.653 ; -7.227,-0.303 -7.227,1.657 ; -7.227,6.177 -4.627,6.177 ; -2.627,6.177 -2.127,6.177 ; 1.873,6.177 2.393,6.177 ; 4.353,6.177 6.973,6.177 ; 6.973,-0.283 6.973,1.647
Top Paste:
  drawing of 8 lines, arcs and shapes, not listed
Bottom Paste:
  drawing of 8 lines, arcs and shapes, not listed
Top Solder:
  region: 8.273,-5.468 5.276,-5.468 5.276,-0.463 8.273,-0.463
  region: -5.527,-5.473 -8.536,-5.473 -8.536,-0.463 -5.527,-0.463
  region: 7.823,1.835 4.828,1.835 4.828,6.037 7.823,6.037
  region: -5.077,1.833 -8.092,1.833 -8.092,6.037 -5.077,6.037
Bottom Solder:
  region: 8.273,-5.465 5.274,-5.465 5.274,-0.463 8.273,-0.463
  region: 7.823,1.834 4.83,1.834 4.83,6.037 7.823,6.037
  region: -5.527,-5.473 -8.536,-5.473 -8.536,-0.463 -5.527,-0.463
  region: -5.077,1.834 -8.087,1.834 -8.087,6.037 -5.077,6.037
Keep-Out Layer:
  region: 4.423,-2.977 -4.68,-2.977 -4.68,3.527 4.423,3.527
Mechanical 1:
  lines w0: -7.377,-3.963 ccw(c-7.027,-3.963) -7.027,-4.313 ccw(c-7.027,-3.963) -6.677,-3.963 -6.677,-1.963 ccw(c-7.027,-1.963) -7.027,-1.613 ccw(c-7.027,-1.963) -7.377,-1.963 -7.377,-3.963 ; -6.927,3.337 ccw(c-6.577,3.337) -6.577,2.987 ccw(c-6.577,3.337) -6.227,3.337 -6.227,4.537 ccw(c-6.577,4.537) -6.577,4.887 ccw(c-6.577,4.537) -6.927,4.537 -6.927,3.337 ; 5.973,3.337 ccw(c6.323,3.337) 6.323,2.987 ccw(c6.323,3.337) 6.673,3.337 6.673,4.537 ccw(c6.323,4.537) 6.323,4.887 ccw(c6.323,4.537) 5.973,4.537 5.973,3.337 ; 6.423,-3.963 ccw(c6.773,-3.963) 6.773,-4.313 ccw(c6.773,-3.963) 7.123,-3.963 7.123,-1.963 ccw(c6.773,-1.963) 6.773,-1.613 ccw(c6.773,-1.963) 6.423,-1.963 6.423,-3.963
Mechanical 13:
  circle w0.2: c-3.63,5.546 r0.25
  lines w0.127: -7.227,-7.673 6.973,-7.673 6.973,6.177 -7.227,6.177 -7.227,-7.673
Mechanical 15:
  lines w0.05: -8.677,-7.923 -8.677,8.082 8.423,8.082 8.423,-7.923 -8.677,-7.923

## usb_b [mm]
pads (6):
  rrect50% 1.7x2.5 hole 0.9 copper offset 0,0.5: 1(1.248,4.705) 2(-1.252,4.705)
  rrect50% 1.7x2.5 hole 0.9 copper offset 0,-0.4: 3(-1.252,2.705) 4(1.248,2.705)
  rrect50% 4.5x6 hole 2.3: S1(-6.022,0.005) S2(6.018,0.005)
Top Overlay:
  circle w0.2: c6.748,4.705 r0.1
  lines w0.2: -6.052,-2.005 -6.052,-10.395 6.048,-10.395 6.048,-2.005 ; -6.052,2.015 -6.052,5.805 6.048,5.805 6.048,2.015
Mechanical 13:
  circle w0.2: c6.748,4.705 r0.1
  lines w0.1: -6.052,-10.395 -6.052,5.805 6.048,5.805 6.048,-10.395 -6.052,-10.395
Mechanical 15:
  lines w0.05: -7.932,-1.905 -7.932,1.915 -6.302,1.915 -6.302,6.055 6.298,6.055 6.298,1.915 7.928,1.915 7.928,-1.905 6.298,-1.905 6.298,-10.645 -6.302,-10.645 -6.302,-1.905 -7.932,-1.905
3D body "USB-B-S-S-B-TH-TR.stp": height 10.7, standoff -3.74, extent -7.234,-10.25 7.266,6.25

## usb_mini_smd [mm]
pads (11):
  rect 0.5x2.25 smd: 1(-1.6,2.675) 2(-0.8,2.675) 3(0,2.675) 4(0.8,2.675) 5(1.6,2.675)
  rect 2x2.5 smd: S1(-4.45,2.55) S2(4.45,2.55) S3(-4.45,-2.9) S4(4.45,-2.9)
  round 0.95 hole 0.95 unplated: ""(-2.2,0) ""(2.2,0)
Top Overlay:
  circle w0.2: c-1.6,4.3 r0.1
  lines w0.127: -3.85,-4.47 -3.85,-5.85 3.85,-5.85 3.85,-4.47 ; -3.85,-1.33 -3.85,0.98 ; -3.13,3.35 -2.17,3.35 ; 2.17,3.35 3.13,3.35 ; 3.85,-1.33 3.85,0.98
Mechanical 13:
  circle w0.2: c-1.6,4.3 r0.1
  lines w0.127: -3.85,-5.85 -3.85,3.35 3.85,3.35 3.85,-5.85 -3.85,-5.85
Mechanical 15:
  lines w0.05: -5.7,-6.1 5.7,-6.1 5.7,4.05 -5.7,4.05 -5.7,-6.1
3D body "mini_usb_smd.STEP": height 3.95, standoff -0.95, extent -4.95,-5.715 4.95,3.61

## VOLUM [mm]
pads (3):
  round 2.5 hole 1.1: H(4.8,0) L(-4.8,0) W(0,0)
Top Overlay:
  lines w0.254: -8.5,-2 -8.5,2 8.5,2 8.5,-2 -8.5,-2

## xh-2*4 [mm]
pads (8):
  oval 3x1.9 hole 1 copper offset -0.5,0 paste+0 mask+0.102: 1(0,0) 2(0,-2.54)
  oval 1.7x2.8 hole 1 copper offset 0,0.4: 3(2.54,0) 5(5.08,0)
  oval 1.7x2.8 hole 1 copper offset 0,-0.4: 4(2.54,-2.54) 6(5.08,-2.54)
  oval 3x1.9 hole 1 copper offset 0.5,0 paste+0 mask+0.102: 7(7.62,0) 8(7.62,-2.54)
Top Overlay:
  rectangle: -4.013,2.29 -0.923,2.938
  lines w0.127: 10.414,2.29 -3.89,2.29 ; -3.89,-4.83 8.97,-4.83 -3.89,-4.83 ; -3.89,-4.83 -3.89,2.29 ; -3.89,-4.83 -3.89,2.29
  lines w0.254: -3.89,-4.83 11.43,-4.83 11.43,2.29 -3.89,2.29 -3.89,-4.83